# Altium footprint library Verdin Development Board.PcbLib: 154 footprints (part 7 of 10)
Each footprint in its own frame and in the unit in brackets; x right, y up, seen from the top. Pads: shape width x height; smd on the part's side, far side on the other; paste and mask are expansions set on the pad; w line width, h text height; cw(c..) or ccw(c..) is an arc to the next point about the centre after c.
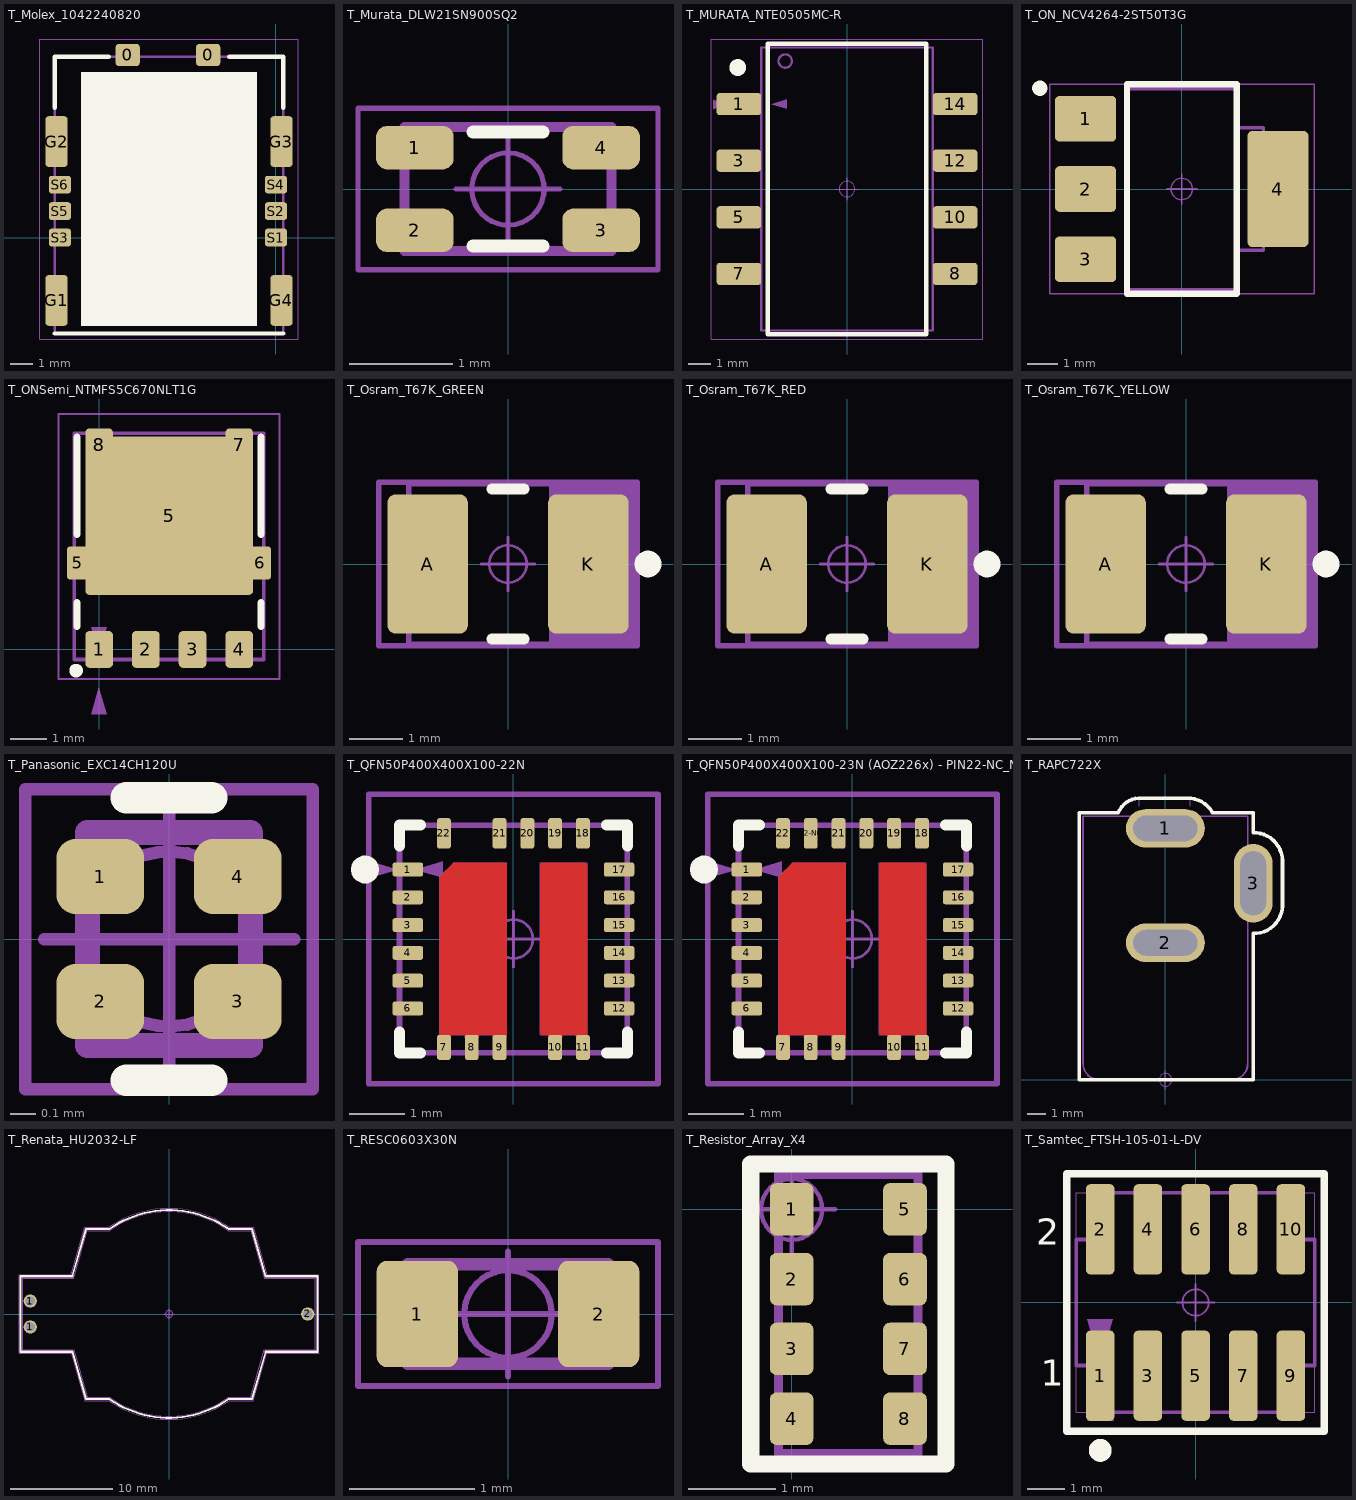
[diagram p6: the footprints below, top view; thin cyan lines are the x and y axes]

## T_Molex_1042240820 [mm]
height 1.21
pads (12):
  rrect30% 1.1x1 smd paste+0 mask+0.05: 0(-6.725,8.275) 0(-3.075,8.275)
  rrect30% 1x2.3 smd paste+0 mask+0.05: G1(-9.95,-2.85) G2(-9.95,4.35) G3(0.25,4.35) G4(0.25,-2.85)
  rrect30% 1x0.8 smd mask+0.05: S1(0,0) S2(0,1.2) S3(-9.8,0) S4(0,2.4) S5(-9.8,1.2) S6(-9.8,2.4)
Top Layer keep-out:
  rectangle: -5.45,-4 -4.25,-1.1
  rectangle: -8,-4 -6.8,-1.1
  rectangle: -2.9,-4 -1.7,-1.1
  rectangle: -2.875,3.5 -1.675,6.4
  rectangle: -7.975,3.5 -6.775,6.4
  rectangle: -5.425,3.5 -4.225,6.4
Top Overlay:
  rectangle: -8.85,-4 -0.85,7.5
  lines w0.2: -10.025,-4.35 0.325,-4.35 ; -10.025,5.875 -10.025,8.2 -7.575,8.2 ; -2.125,8.2 0.325,8.2 0.325,5.875
Top Component Outline:
  lines w0.05: -10.7,-4.6 1,-4.6 1,9 -10.7,9 -10.7,-4.6
Top Dimensions:
  lines w0.1: -10.025,-4.35 -10.025,8.2 0.325,8.2 0.325,-4.35 -10.025,-4.35
Top Component Center:
  circle w0.05: c-4.825,1.8 r0.35
  lines w0.05: -5.325,1.8 -4.325,1.8 ; -4.825,1.3 -4.825,2.3
Top Assembly:
  text ".Designator" at -5.125,1 h0.75
3D body "1042240820.stp": height 1.1, standoff -0.01, extent -10.025,-4.35 0.325,8.2

## T_Murata_DLW21SN900SQ2 [mm]
pads (4):
  rrect50% 0.75x0.42 smd: 1(-0.9,0.4) 2(-0.9,-0.4) 3(0.9,-0.4) 4(0.9,0.4)
Top Overlay:
  lines w0.127: -0.34,-0.55 0.34,-0.55 ; -0.34,0.55 0.34,0.55
Top Component Outline:
  lines w0.05: -1.45,-0.78 1.45,-0.78 1.45,0.78 -1.45,0.78 -1.45,-0.78
Top 3D Body:
  lines w0.001: -1,-0.6 1,-0.6 1,0.6 -1,0.6 -1,-0.6
Top Dimensions:
  lines w0.1: -1,-0.6 1,-0.6 1,0.6 -1,0.6 -1,-0.6
Top Component Center:
  circle w0.05: c0,0 r0.35
  lines w0.05: -0.5,0 0.5,0 ; 0,-0.5 0,0.5
Top Assembly:
  text ".Designator" at -1.625,1.05 h0.75
3D body "User Library-EMI Filter DLW21S.STEP": height 1.2, standoff 0, extent -1,-0.6 1,0.6

## T_MURATA_NTE0505MC-R [mm]
pads (8):
  rrect30% 2x1 smd: 1(-4.85,3.81) 3(-4.85,1.27) 5(-4.85,-1.27) 7(-4.85,-3.81) 8(4.85,-3.81) 10(4.85,-1.27) 12(4.85,1.27) 14(4.85,3.81)
Top Overlay:
  circle w0.5: c-4.905,5.45 r0.125
  lines w0.2: -3.56,-6.51 3.56,-6.51 3.56,6.51 -3.56,6.51 -3.56,-6.51
Top Component Outline:
  region: -6.005,3.581 -5.295,3.793 -6.005,4.007
  lines w0.05: -6.08,-6.73 6.08,-6.73 6.08,6.73 -6.08,6.73 -6.08,-6.73
Top 3D Body:
  lines w0.001: -3.85,-6.35 3.85,-6.35 3.85,6.35 -3.85,6.35 -3.85,-6.35
Top Dimensions:
  circle w0.1: c-2.77,5.74 r0.3
  region: -2.695,4.019 -3.405,3.807 -2.695,3.593
  lines w0.1: -3.85,-6.35 3.85,-6.35 3.85,6.35 -3.85,6.35 -3.85,-6.35
Top Component Center:
  circle w0.05: c0,0 r0.35
  lines w0.05: -0.5,0 0.5,0 ; 0,-0.5 0,0.5
Top Assembly:
  text ".Designator" at -2.007,7.087 h0.75
3D body "User Library-NTE0303MC.STEP": height 6.35, standoff -0.25, extent -5.725,-6.348 5.725,6.348

## T_ON_NCV4264-2ST50T3G [mm]
pads (4):
  rrect20% 2x1.5 smd: 1(-3.15,2.3) 2(-3.15,0) 3(-3.15,-2.3)
  rrect15% 2x3.8 smd: 4(3.15,0)
Top Overlay:
  circle w0.25: c-4.65,3.3 r0.125
  lines w0.2: -1.8,-3.43 -1.8,3.43 1.8,3.43 1.8,-3.43 -1.8,-3.43
Top Component Outline:
  lines w0.05: -4.33,-3.43 -4.33,3.43 4.33,3.43 4.33,-3.43 -4.33,-3.43
Top 3D Body:
  lines w0.001: -1.85,-3.251 1.85,-3.251 1.85,3.251 -1.85,3.251 -1.85,-3.251
Top Dimensions:
  lines w0.1: 1.79,-2.006 2.68,-2.006 2.68,2.006 1.79,2.006 ; -1.85,-3.302 -1.85,3.302 1.79,3.302 1.79,-3.302 -1.85,-3.302
Top Component Center:
  circle w0.05: c0,0 r0.35
  lines w0.05: -0.5,0 0.5,0 ; 0,-0.5 0,0.5
Top Assembly:
  text ".Designator" at -1.807,3.912 h0.75
3D body "User Library-SOT223-3.step": height 1.7, standoff 0, extent -3.5,-3.25 3.5,3.25

## T_ONSemi_NTMFS5C670NLT1G [mm]
pads (9):
  rrect30% 0.75x1 smd paste+0 mask+0.05: 1(0,0) 2(1.27,0) 3(2.54,0) 4(3.81,0)
  rrect30% 0.6x0.905 smd paste+0 mask+0.05: 5(-0.575,2.35) 6(4.375,2.35)
  rrect5% 4.56x4.3 smd paste-0.9 mask+0.05: 5(1.905,3.635)
  rrect30% 0.75x0.905 smd paste+0 mask+0.05: 7(3.81,5.56) 8(0,5.56)
Top Overlay:
  circle w0.3: c-0.625,-0.575 r0.035
  lines w0.2: -0.6,0.625 -0.6,1.275 ; -0.6,3.125 -0.6,5.775 ; 4.4,0.625 4.4,1.275 ; 4.4,3.125 4.4,5.775
Top Component Outline:
  region: 0.206,-1.755 -0.006,-1.045 -0.22,-1.755
  lines w0.05: -1.1,-0.8 4.9,-0.8 4.9,6.4 -1.1,6.4 -1.1,-0.8
Top Dimensions:
  region: -0.219,0.605 -0.007,-0.105 0.207,0.605
  lines w0.1: -0.675,-0.275 -0.675,5.875 4.475,5.875 4.475,-0.275 -0.675,-0.275
Top Component Center:
  circle w0.05: c1.9,2.8 r0.35
  lines w0.05: 1.4,2.8 2.4,2.8 ; 1.9,2.3 1.9,3.3
Top Assembly:
  text ".Designator" at 1.375,2.625 h0.75
3D body "NTMFS6B03NT1G--3DModel-STEP-56544.STEP": height 1.1, standoff 0, extent -0.675,-0.275 4.475,5.875

## T_Osram_T67K_GREEN [mm]
pads (2):
  rrect20% 1.5x2.6 smd: A(-1.5,0) K(1.5,0)
Top Overlay:
  circle w0.25: c2.613,0 r0.125
  lines w0.2: -0.3,-1.4 0.3,-1.4 ; -0.3,1.4 0.3,1.4
Top Component Outline:
  rectangle: 1.325,-1.524 2.413,1.524
  lines w0.1: -2.413,-1.524 -2.413,1.524 2.413,1.524 2.413,-1.524 -2.413,-1.524
Top 3D Body:
  lines w0.001: -1.85,-1.5 -1.85,1.5 1.85,1.5 1.85,-1.5 -1.85,-1.5
Top Dimensions:
  rectangle: 0.762,-1.5 1.85,1.5
  lines w0.1: -1.85,-1.5 1.85,-1.5 1.85,1.5 -1.85,1.5 -1.85,-1.5
Top Component Center:
  circle w0.05: c0,0 r0.35
  lines w0.05: -0.5,0 0.5,0 ; 0,-0.5 0,0.5
Top Assembly:
  text ".Designator" at -1.8,1.8 h0.75
3D body "User Library-LHT674_YELLOW.STEP": height 1.95, standoff -0.15, extent -1.85,-1.5 1.85,1.5

## T_Osram_T67K_RED [mm]
pads (2):
  rrect20% 1.5x2.6 smd: A(-1.5,0) K(1.5,0)
Top Overlay:
  circle w0.25: c2.613,0 r0.125
  lines w0.2: -0.3,-1.4 0.3,-1.4 ; -0.3,1.4 0.3,1.4
Top Component Outline:
  rectangle: 1.325,-1.524 2.413,1.524
  lines w0.1: -2.413,-1.524 -2.413,1.524 2.413,1.524 2.413,-1.524 -2.413,-1.524
Top 3D Body:
  lines w0.001: -1.85,-1.5 1.85,-1.5 1.85,1.5 -1.85,1.5 -1.85,-1.5
Top Dimensions:
  rectangle: 0.762,-1.5 1.85,1.5
  lines w0.1: -1.85,-1.5 -1.85,1.5 1.85,1.5 1.85,-1.5 -1.85,-1.5
Top Component Center:
  circle w0.05: c0,0 r0.35
  lines w0.05: -0.5,0 0.5,0 ; 0,-0.5 0,0.5
Top Assembly:
  text ".Designator" at -1.8,1.825 h0.75
3D body "User Library-LHT674_RED.STEP": height 1.95, standoff -0.15, extent -1.85,-1.5 1.85,1.5

## T_Osram_T67K_YELLOW [mm]
pads (2):
  rrect20% 1.5x2.6 smd: A(-1.5,0) K(1.5,0)
Top Overlay:
  circle w0.25: c2.613,0 r0.125
  lines w0.2: -0.3,-1.4 0.3,-1.4 ; -0.3,1.4 0.3,1.4
Top Component Outline:
  rectangle: 1.325,-1.524 2.413,1.524
  lines w0.1: -2.413,-1.524 2.413,-1.524 2.413,1.524 -2.413,1.524 -2.413,-1.524
Top 3D Body:
  lines w0.001: -1.85,-1.5 -1.85,1.5 1.85,1.5 1.85,-1.5 -1.85,-1.5
Top Dimensions:
  rectangle: 0.762,-1.5 1.85,1.5
  lines w0.1: -1.85,-1.5 1.85,-1.5 1.85,1.5 -1.85,1.5 -1.85,-1.5
Top Component Center:
  circle w0.05: c0,0 r0.35
  lines w0.05: -0.5,0 0.5,0 ; 0,-0.5 0,0.5
Top Assembly:
  text ".Designator" at -1.8,1.85 h0.75
3D body "User Library-LHT674_YELL.STEP": height 1.95, standoff -0.15, extent -1.85,-1.5 1.85,1.5

## T_Panasonic_EXC14CH120U [mm]
height 0.45
pads (4):
  rrect50% 0.35x0.3 smd mask+0.05: 1(-0.275,0.25) 2(-0.275,-0.25) 3(0.275,-0.25) 4(0.275,0.25)
Top Overlay:
  lines w0.127: -0.17,-0.565 0.17,-0.565 ; -0.17,0.565 0.17,0.565
Top Component Outline:
  lines w0.05: -0.575,-0.6 0.575,-0.6 0.575,0.6 -0.575,0.6 -0.575,-0.6
Top 3D Body:
  lines w0.01: -0.325,-0.425 -0.325,0.425 0.325,0.425 0.325,-0.425 -0.325,-0.425
Top Dimensions:
  lines w0.1: -0.325,-0.425 0.325,-0.425 0.325,0.425 -0.325,0.425 -0.325,-0.425
Top Component Center:
  circle w0.05: c0,0 r0.35
  lines w0.05: -0.5,0 0.5,0 ; 0,-0.5 0,0.5
Top Assembly:
  text ".Designator" at -0.3,-0.175 h0.6
3D body: height 0.45, standoff 0, extent -0.324,-0.424 0.324,0.424

## T_QFN50P400X400X100-22N [mm]
pads (22):
  rrect35% 0.55x0.25 smd mask+0.051: 1(-1.9,1.25) 2(-1.9,0.75) 3(-1.9,0.25) 4(-1.9,-0.25) 5(-1.9,-0.75) 6(-1.9,-1.25) 12(1.9,-1.25) 13(1.9,-0.75) 14(1.9,-0.25) 15(1.9,0.25) 16(1.9,0.75) 17(1.9,1.25)
  rrect35% 0.25x0.45 smd mask+0.051: 7(-1.25,-1.95) 8(-0.75,-1.95) 9(-0.25,-1.95) 10(0.75,-1.95) 11(1.25,-1.95)
  rrect35% 0.25x0.55 smd mask+0.051: 18(1.25,1.9) 19(0.75,1.9) 20(0.25,1.9) 21(-0.25,1.9) 22(-1.25,1.9)
Top Layer:
  region: -1.3,1.15 -1.307,1.143 -1.318,1.126 -1.326,1.107 -1.33,1.088 -1.33,1.078 -1.33,-1.875 -1.125,-1.875 -1.125,-1.75 -1.125,-1.745 -1.121,-1.736 -1.114,-1.729 -1.105,-1.725 -1.1,-1.725 -0.9,-1.725 -0.895,-1.725 -0.886,-1.729 -0.879,-1.736 -0.875,-1.745 -0.875,-1.75 -0.875,-1.775 -0.625,-1.775 -0.625,-1.75 -0.625,-1.745 -0.621,-1.736 -0.614,-1.729 -0.605,-1.725 -0.6,-1.725 -0.4,-1.725 -0.395,-1.725 -0.386,-1.729 -0.379,-1.736 -0.375,-1.745 -0.375,-1.75 -0.375,-1.775 -0.125,-1.775 -0.125,1.325 -0.125,1.335 -0.133,1.353 -0.147,1.367 -0.165,1.375 -0.175,1.375 -1.05,1.375 -1.056,1.375 -1.068,1.373 -1.079,1.368 -1.088,1.362 -1.093,1.357
  region: 0.525,1.375 0.516,1.375 0.5,1.368 0.487,1.356 0.48,1.339 0.48,1.33 0.48,-1.68 0.48,-1.689 0.487,-1.706 0.499,-1.718 0.516,-1.725 0.525,-1.725 0.6,-1.725 0.605,-1.725 0.614,-1.729 0.621,-1.736 0.625,-1.745 0.625,-1.75 0.625,-1.775 0.875,-1.775 0.875,-1.75 0.875,-1.745 0.879,-1.736 0.886,-1.729 0.895,-1.725 0.9,-1.725 1.1,-1.725 1.105,-1.725 1.114,-1.729 1.121,-1.736 1.125,-1.745 1.125,-1.75 1.125,-1.8 1.255,-1.8 1.27,-1.8 1.297,-1.789 1.319,-1.767 1.33,-1.74 1.33,-1.725 1.33,1.32 1.33,1.331 1.322,1.351 1.306,1.367 1.286,1.375 1.275,1.375
  region: 0.55,1.375
Top Overlay:
  circle w0.25: c-2.671,1.25 r0.125
  lines w0.2: -2.05,-1.676 -2.05,-2.05 -1.676,-2.05 ; -2.05,1.676 -2.05,2.05 -1.676,2.05 ; 1.676,-2.05 2.05,-2.05 2.05,-1.676 ; 1.676,2.05 2.05,2.05 2.05,1.676
Top Paste:
  region: 0.7,1.15 1.125,1.15 1.125,-1.5 0.7,-1.5
  region: -0.975,1.125 -1.075,1.025 -1.075,-1.475 -0.375,-1.475 -0.375,1.125
Top Component Outline:
  region: -2.578,1.1 -2.078,1.25 -2.578,1.4
  lines w0.1: -2.6,-2.6 2.6,-2.6 2.6,2.6 -2.6,2.6 -2.6,-2.6
Top 3D Body:
  lines w0.001: -1.325,1.345 -1.325,1.375 -1.295,1.375 ; -2.05,-2.05 2.05,-2.05 2.05,2.05 -2.05,2.05 -2.05,-2.05 ; -1.325,-1.725 -1.325,1.118 -1.068,1.375 -0.125,1.375 -0.125,-1.725 -1.325,-1.725 ; 0.48,-1.725 1.33,-1.725 1.33,1.375 0.48,1.375 0.48,-1.725
Top Dimensions:
  region: -1.273,1.4 -1.773,1.25 -1.273,1.1
  lines w0.1: -2.05,-2.05 2.05,-2.05 2.05,2.05 -2.05,2.05 -2.05,-2.05
Top Component Center:
  circle w0.05: c0,0 r0.35
  lines w0.05: -0.5,0 0.5,0 ; 0,-0.5 0,0.5
Top Assembly:
  text ".Designator" at -1.75,2.9 h0.75
3D body "test-18.step": height 1, standoff 0, extent -2.051,-2.051 2.051,2.051

## T_QFN50P400X400X100-23N (AOZ226x) - PIN22-NC_NOPASTE - duplicate [mm]
pads (23):
  rrect35% 0.55x0.25 smd mask+0.051: 1(-1.9,1.25) 2(-1.9,0.75) 3(-1.9,0.25) 4(-1.9,-0.25) 5(-1.9,-0.75) 6(-1.9,-1.25) 12(1.9,-1.25) 13(1.9,-0.75) 14(1.9,-0.25) 15(1.9,0.25) 16(1.9,0.75) 17(1.9,1.25)
  rrect35% 0.25x0.45 smd mask+0.051: 7(-1.25,-1.95) 8(-0.75,-1.95) 9(-0.25,-1.95) 10(0.75,-1.95) 11(1.25,-1.95)
  rrect35% 0.25x0.55 smd mask+0.051: 18(1.25,1.9) 19(0.75,1.9) 20(0.25,1.9) 21(-0.25,1.9) 22(-1.25,1.9)
  rrect35% 0.25x0.55 smd paste-0.25 mask+0.051: 22-NC(-0.75,1.9)
Top Layer:
  region: 0.55,1.375
  region: 0.525,1.375 0.516,1.375 0.5,1.368 0.487,1.356 0.48,1.339 0.48,1.33 0.48,-1.68 0.48,-1.689 0.487,-1.706 0.499,-1.718 0.516,-1.725 0.525,-1.725 0.6,-1.725 0.605,-1.725 0.614,-1.729 0.621,-1.736 0.625,-1.745 0.625,-1.75 0.625,-1.775 0.875,-1.775 0.875,-1.75 0.875,-1.745 0.879,-1.736 0.886,-1.729 0.895,-1.725 0.9,-1.725 1.1,-1.725 1.105,-1.725 1.114,-1.729 1.121,-1.736 1.125,-1.745 1.125,-1.75 1.125,-1.8 1.255,-1.8 1.27,-1.8 1.297,-1.789 1.319,-1.767 1.33,-1.74 1.33,-1.725 1.33,1.32 1.33,1.331 1.322,1.351 1.306,1.367 1.286,1.375 1.275,1.375
  region: -1.3,1.15 -1.307,1.143 -1.318,1.126 -1.326,1.107 -1.33,1.088 -1.33,1.078 -1.33,-1.875 -1.125,-1.875 -1.125,-1.75 -1.125,-1.745 -1.121,-1.736 -1.114,-1.729 -1.105,-1.725 -1.1,-1.725 -0.9,-1.725 -0.895,-1.725 -0.886,-1.729 -0.879,-1.736 -0.875,-1.745 -0.875,-1.75 -0.875,-1.775 -0.625,-1.775 -0.625,-1.75 -0.625,-1.745 -0.621,-1.736 -0.614,-1.729 -0.605,-1.725 -0.6,-1.725 -0.4,-1.725 -0.395,-1.725 -0.386,-1.729 -0.379,-1.736 -0.375,-1.745 -0.375,-1.75 -0.375,-1.775 -0.125,-1.775 -0.125,1.325 -0.125,1.335 -0.133,1.353 -0.147,1.367 -0.165,1.375 -0.175,1.375 -1.05,1.375 -1.056,1.375 -1.068,1.373 -1.079,1.368 -1.088,1.362 -1.093,1.357
Top Overlay:
  circle w0.25: c-2.671,1.25 r0.125
  lines w0.2: -2.05,-1.676 -2.05,-2.05 -1.676,-2.05 ; -2.05,1.676 -2.05,2.05 -1.676,2.05 ; 1.676,-2.05 2.05,-2.05 2.05,-1.676 ; 1.676,2.05 2.05,2.05 2.05,1.676
Top Paste:
  region: -0.975,1.125 -1.075,1.025 -1.075,-1.475 -0.375,-1.475 -0.375,1.125
  region: 0.7,1.15 1.125,1.15 1.125,-1.5 0.7,-1.5
Top Component Outline:
  region: -2.578,1.1 -2.078,1.25 -2.578,1.4
  lines w0.1: -2.6,-2.6 -2.6,2.6 2.6,2.6 2.6,-2.6 -2.6,-2.6
Top 3D Body:
  lines w0.001: -1.325,1.345 -1.325,1.375 -1.295,1.375 ; -2.05,-2.05 -2.05,2.05 2.05,2.05 2.05,-2.05 -2.05,-2.05 ; -1.325,-1.725 -0.125,-1.725 -0.125,1.375 -1.068,1.375 -1.325,1.118 -1.325,-1.725 ; 0.48,-1.725 0.48,1.375 1.33,1.375 1.33,-1.725 0.48,-1.725
Top Dimensions:
  region: -1.273,1.4 -1.773,1.25 -1.273,1.1
  lines w0.1: -2.05,-2.05 -2.05,2.05 2.05,2.05 2.05,-2.05 -2.05,-2.05
Top Component Center:
  circle w0.05: c0,0 r0.35
  lines w0.05: -0.5,0 0.5,0 ; 0,-0.5 0,0.5
Top Assembly:
  text ".Designator" at -1.75,2.9 h0.75
3D body "test-18.step": height 1, standoff 0, extent -2.051,-2.051 2.051,2.051

## T_RAPC722X [mm] "Connector, 2.1mm (Dia), 5.5mm(Dia), Round Power Socket"
height 10.7
pads (3):
  oval 4.3x2.1 hole 1.4 slot 3.5 at 0 deg: 1(0,13.74) 2(0,7.49)
  oval 2.1x4.3 hole 1.4 slot 3.5 at 90 deg: 3(4.8,10.74)
Top Overlay:
  lines w0.2: 1.196,15.393 -1.3,15.393 ccw(c-1.385,14.115) -2.569,14.6 -4.7,14.6 -4.7,0 4.79,0 4.79,8 ccw(c4.843,9.553) 6.396,9.499 6.396,11.996 ccw(c4.841,11.945) 4.79,13.5 4.79,14.59 4.78,14.6 2.569,14.6 ccw(c1.234,13.866) 1.2,15.388
Top Component Outline:
  lines w0.05: -1.332,15.393 1.164,15.393 ; -1.332,15.394 ccw(c-1.384,14.115) -2.568,14.6 -4.7,14.6 -4.7,0 4.8,0 4.8,8 ccw(c4.843,9.553) 6.396,9.499 6.396,11.996 ccw(c4.841,11.945) 4.8,13.5 4.8,14.6 2.568,14.6 ; 1.169,15.388 cw(c1.203,13.866) 2.537,14.6
Top 3D Body:
  lines w0.001: -1.432,14.95 -1.432,15.4 ; -1.4,13.95 -1.4,14.4 -4.5,14.4 -4.5,0.9 ccw(c-3.6,0.9) -3.6,0 3.6,0 ; 1.368,14.95 1.368,15.4 ; 1.4,13.95 1.4,14.4 4.5,14.4 4.5,0.9 cw(c3.6,0.9) 3.6,0
Top Dimensions:
  lines w0.1: -4.5,0.9 ccw(c-3.6,0.9) -3.6,0 3.6,0 ccw(c3.6,0.9) 4.5,0.9 4.5,14.4 -4.5,14.4 -4.5,0.9
Top Component Center:
  circle w0.05: c0,0 r0.35
  lines w0.05: -0.5,0 0.5,0 ; 0,-0.5 0,0.5
Top Assembly:
  text ".Designator" at -1.5,10.5 h0.75
3D body: height 10.7, standoff 0, extent -4.5,0 4.5,14.4
3D body: height 4, standoff -3.7, extent 4.5,9.45 4.7,11.85
3D body: height 4, standoff -3.7, extent -1.2,7.55 1.2,7.75
3D body: height 4, standoff -3.7, extent -1.4,13.55 1.4,13.75
3D body: height 9.59, standoff 3.21, extent -3.2,0 3.175,2
3D body: height 7.4, standoff 5.4, extent -1,0 0.992,2

## T_Renata_HU2032-LF [mm]
pads (3):
  round 1.3 hole 0.9: 1(-13.6,-1.27) 1(-13.6,1.27) 2(13.6,0)
Top Overlay:
  lines w0.2: -5.86,8.331 -8.133,8.331 -9.483,3.7 -14.55,3.7 -14.55,-3.7 ; -5.845,-8.331 -8.135,-8.331 -9.48,-3.7 -14.55,-3.7 ; -5.843,-8.33 ccw(c0,0) 5.839,-8.334 ; -5.839,8.334 cw(c0,0) 5.843,8.33 ; 5.845,8.331 8.135,8.331 9.48,3.7 14.55,3.7 ; 5.86,-8.331 8.133,-8.331 9.483,-3.7 14.55,-3.7 14.55,3.7 ; -14.55,-3.7 -14.55,-3.7 ; 14.55,3.7 14.55,3.7
Top Component Outline:
  lines w0.05: -14.702,-3.851 -14.702,3.849 -9.599,3.849 ; -14.7,-3.85 -9.599,-3.85 -8.252,-8.489 -5.895,-8.489 ccw(c0,0) 5.895,-8.489 8.252,-8.489 ; -9.599,3.849 -8.252,8.489 ; -8.252,8.489 -5.895,8.489 cw(c0,0) 5.895,8.489 8.252,8.489 9.599,3.85 14.7,3.85 14.7,-3.85 ; 8.252,-8.489 9.599,-3.849 ; 9.599,-3.849 14.702,-3.849
Top 3D Body:
  lines w0.01: -14.35,-3.5 -9.35,-3.5 -8,-8.15 -5.818,-8.15 ccw(c0,0) 5.818,-8.15 8,-8.15 9.35,-3.5 14.35,-3.5 14.35,3.5 9.35,3.5 8,8.15 5.818,8.15 ccw(c0,0) -5.818,8.15 -8,8.15 -9.35,3.5 -14.35,3.5 -14.35,-3.5
Top Dimensions:
  lines w0.1: -14.35,-3.5 -9.35,-3.5 -8,-8.15 -5.818,-8.15 ccw(c0,0) 5.818,-8.15 8,-8.15 9.35,-3.5 14.35,-3.5 14.35,3.5 9.35,3.5 8,8.15 5.818,8.15 ccw(c0,0) -5.818,8.15 -8,8.15 -9.35,3.5 -14.35,3.5 -14.35,-3.5
Top Component Center:
  circle w0.05: c0,0 r0.35
  lines w0.05: -0.5,0 0.5,0 ; 0,-0.5 0,0.5
Top Assembly:
  text ".Designator" at -1.75,10.7 h0.75
3D body "CircuitWorks-BATT HOLDER DIP (SMTU2032-LF).STEP": height 5.4, standoff -2, extent -14.25,-8.05 14.25,8.05
3D body "User Library-CR 2032 Lithium Cell.STEP": height 4.5, standoff 1.3, extent -10,-10 10,10

## T_RESC0603X30N [mm]
pads (2):
  rrect25% 0.65x0.85 smd: 1(-0.725,0) 2(0.725,0)
Top Component Outline:
  lines w0.05: -1.2,-0.575 1.2,-0.575 1.2,0.575 -1.2,0.575 -1.2,-0.575
Top 3D Body:
  lines w0.001: -0.8,-0.4 0.8,-0.4 0.8,0.4 -0.8,0.4 -0.8,-0.4
Top Dimensions:
  lines w0.1: -0.8,-0.4 0.8,-0.4 0.8,0.4 -0.8,0.4 -0.8,-0.4
Top Component Center:
  circle w0.05: c0,0 r0.35
  lines w0.05: -0.5,0 0.5,0 ; 0,-0.5 0,0.5
Top Assembly:
  text ".Designator" at -1.2,0.8 h0.75
3D body "User Library-RES_1609-0603.step": height 0.56, standoff 0, extent -0.85,-0.4 0.85,0.4

## T_Resistor_Array_X4 [mm]
pads (8):
  rrect30% 0.5x0.6 smd: 1(0,0) 2(0,-0.8) 3(0,-1.6) 4(0,-2.4) 5(1.3,0) 6(1.3,-0.8) 7(1.3,-1.6) 8(1.3,-2.4)
Top Overlay:
  lines w0.2: -0.47,-2.92 -0.47,0.52 1.77,0.52 1.77,-2.92 -0.47,-2.92
Top Component Outline:
  lines w0.05: -0.47,-2.92 -0.47,0.52 1.77,0.52 1.77,-2.92 -0.47,-2.92
Top 3D Body:
  lines w0.001: -0.15,-2.8 -0.15,0.4 1.45,0.4 1.45,-2.8 -0.15,-2.8
Top Dimensions:
  lines w0.1: -0.15,-2.8 -0.15,0.4 1.45,0.4 1.45,-2.8 -0.15,-2.8
Top Component Center:
  circle w0.05: c0,0 r0.35
  lines w0.05: -0.5,0 0.5,0 ; 0,-0.5 0,0.5
Top Assembly:
  text ".Designator" at -1,0.8 h0.75
3D body "User Library-R-0603-Array-4-1.STEP": height 0.51, standoff -0.01, extent -0.15,-2.8 1.45,0.4

## T_Samtec_FTSH-105-01-L-DV [mm]
pads (10):
  rrect30% 0.76x2.4 smd: 1(-2.54,-1.95) 2(-2.54,1.95) 3(-1.27,-1.95) 4(-1.27,1.95) 5(0,-1.95) 6(0,1.95) 7(1.27,-1.95) 8(1.27,1.95) 9(2.54,-1.95) 10(2.54,1.95)
Top Overlay:
  circle w0.4: c-2.54,-3.937 r0.105
  lines w0.2: -3.429,-3.429 3.429,-3.429 3.429,3.429 -3.429,3.429 -3.429,-3.429
  text "1" at -4.122,-2.215 h0.7
  text "2" at -4.249,1.544 h0.7
Top Component Outline:
  region: -2.185,-3.15 -2.525,-2.015 -2.865,-3.15
  lines w0.05: -3.429,-3.429 -3.429,3.429 3.429,3.429 3.429,-3.429 -3.429,-3.429
Top 3D Body:
  lines w0.001: -3.175,-2.921 3.175,-2.921 3.175,2.921 -3.175,2.921 -3.175,-2.921 ; -3.175,-1.675 -2.55,-1.675 -2.55,-2.925 2.53,-2.925 2.53,-1.675 3.175,-1.675 3.175,1.675 2.53,1.675 2.53,2.925 -2.55,2.925 -2.55,1.675 -3.175,1.675 -3.175,-1.675
Top Dimensions:
  region: -2.89,-0.45 -2.55,-1.585 -2.21,-0.45
  lines w0.1: -3.175,-1.675 -2.55,-1.675 -2.55,-2.925 2.53,-2.925 2.53,-1.675 3.175,-1.675 3.175,1.675 2.53,1.675 2.53,2.925 -2.55,2.925 -2.55,1.675 -3.175,1.675 -3.175,-1.675
Top Component Center:
  circle w0.05: c0,0 r0.35
  lines w0.05: -0.5,0 0.5,0 ; 0,-0.5 0,0.5
Top Assembly:
  text ".Designator" at -1.725,3.725 h0.75
3D body "FTSH-105-01-L-DV-K_2_14.stp": height 6.1, standoff -0.02, extent -3.175,-2.921 3.175,2.921